# Altium schematic symbol library R_33K2.SchLib: 1 symbol
Pins are listed as number, name and electrical type; pins without a type are passive.

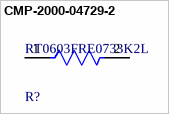
[diagram p0: symbol CMP-2000-04729-2]

## CMP-2000-04729-2
designator R?, comment RT0603FRE0733K2L
RES SMD 33.2K OHM 1% 1/10W 0603; Manufacturer: Yageo; Resistance: 33.2KΩ; Tolerance: 0.01; Temperature Coefficient: 50 ppm/°C; Power Rating: 0.1W; Voltage Rating: 75V; Value: 33.2KΩ; Temperature Range Low: -55°C; Composition: Thin Film; Manufacturer Part Number: RT0603FRE0733K2L; Temperature Range High: +155°C; Height: 0.55mm; Automotive: No; ComponentLink2Description: Datasheet; Category: Res; Device Class L3: Chip SMD Resistors; Mouser Description: Thin Film Resistors 1/10W 33.2K ohm 1% 50ppm; RoHS: TRUE; Ipc Land Pattern Name: RESC16080X45; Temperature: -55°C to +155°C; Lead Free: Yes; Footprint Url: http://www.yageo.com/exep/pages/download/literatures/PYu-R_Mount_10.pdf; Device Class L2: Resistors; Octopart: https://octopart.com/rt0603fre0733k2l-yageo-1215647; Package: RT0603; Series: RT; Device Class L1: Passive Components; Digikey Description: RES SMD 33.2K OHM 1% 1/10W 0603; ComponentLink2URL: http://www.yageo.com/documents/recent/PYu-RT_1-to-0.01_RoHS_L_9.pdf
footprint FP-RT0603-IPC_C
footprint FP-RT0603-MFG
footprint FP-RT0603-IPC_A
footprint FP-RT0603-IPC_B
pins: 1, 2